# Altium footprint library My_FOC_v1.PcbLib: 11 footprints
Each footprint in its own frame and in the unit in brackets; x right, y up, seen from the top. Pads: shape width x height; smd on the part's side, far side on the other; paste and mask are expansions set on the pad; w line width, h text height; cw(c..) or ccw(c..) is an arc to the next point about the centre after c.
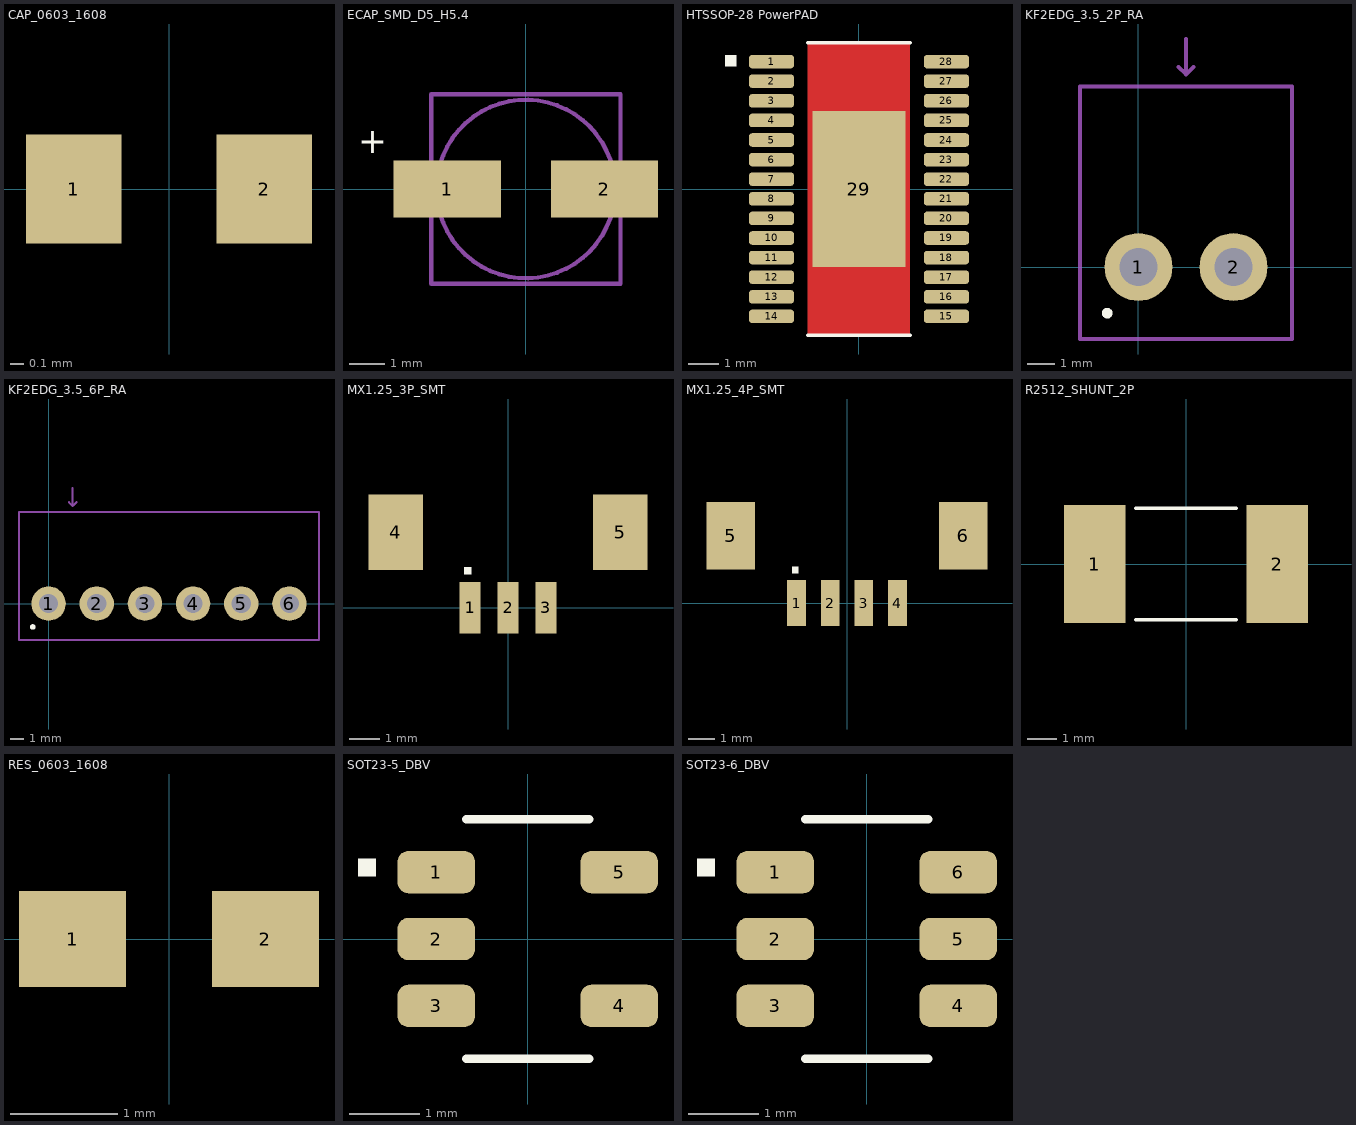
[diagram p0: the footprints below, top view; thin cyan lines are the x and y axes]

## CAP_0603_1608 [mm]
pads (2):
  rect 0.7x0.8 smd mask+0: 1(-0.7,0) 2(0.7,0)

## ECAP_SMD_D5_H5.4 [mm]
pads (2):
  rect 3x1.6 smd mask+0: 1(-2.2,0) 2(2.2,0)
Top Overlay:
  text "+" at -4.699,0.765 h1.2
Mechanical 1:
  circle w0.12: c0,0 r2.5
  lines w0.12: -2.65,-2.65 2.65,-2.65 2.65,2.65 -2.65,2.65 -2.65,-2.65

## HTSSOP-28 PowerPAD [mm] "Need to design Vias"
pads (29):
  rrect50% 1.5x0.45 smd: 1(-2.9,4.225) 2(-2.9,3.575) 3(-2.9,2.925) 4(-2.9,2.275) 5(-2.9,1.625) 6(-2.9,0.975) 7(-2.9,0.325) 8(-2.9,-0.325) 9(-2.9,-0.975) 10(-2.9,-1.625) 11(-2.9,-2.275) 12(-2.9,-2.925) 13(-2.9,-3.575) 14(-2.9,-4.225) 15(2.9,-4.225) 16(2.9,-3.575) 17(2.9,-2.925) 18(2.9,-2.275) 19(2.9,-1.625) 20(2.9,-0.975) 21(2.9,-0.325) 22(2.9,0.325) 23(2.9,0.975) 24(2.9,1.625) 25(2.9,2.275) 26(2.9,2.925) 27(2.9,3.575) 28(2.9,4.225)
  rect 3.1x5.18 smd paste+0 mask+0: 29(0,0)
Top Layer:
  rectangle: -1.7,-4.85 1.7,4.85
Top Overlay:
  rectangle: -4.445,4.064 -4.064,4.445
  lines w0.12: -1.7,-4.85 1.7,-4.85 ; -1.7,4.85 1.7,4.85

## KF2EDG_3.5_2P_RA [mm]
pads (2):
  round 2.5 hole 1.4: 1(0,0) 2(3.5,0)
Top Overlay:
  circle w0.254: c-1.15,-1.7 r0.071
Mechanical 1:
  lines w0.15: 1.475,7.375 1.725,7.125 ; 1.75,7.1 1.75,8.4 ; 1.776,7.118 2.026,7.368 ; -2.15,-2.65 -2.15,6.65 5.65,6.65 5.65,-2.65 -2.15,-2.65
  text "INSERT" at -0.78,4.12 h0.8

## KF2EDG_3.5_6P_RA [mm]
pads (6):
  round 2.5 hole 1.4: 1(0,0) 2(3.5,0) 3(7,0) 4(10.5,0) 5(14,0) 6(17.5,0)
Top Overlay:
  circle w0.254: c-1.15,-1.7 r0.071
Mechanical 1:
  lines w0.15: 1.475,7.375 1.725,7.125 ; 1.75,7.1 1.75,8.4 ; 1.776,7.118 2.026,7.368 ; -2.15,-2.65 19.65,-2.65 19.65,6.65 -2.15,6.65 -2.15,-2.65
  text "INSERT" at -0.78,4.12 h0.8

## MX1.25_3P_SMT [mm]
pads (5):
  rect 0.7x1.7 smd: 1(-1.25,0) 2(0,0) 3(1.25,0)
  rect 1.8x2.5 smd: 4(-3.7,2.5) 5(3.7,2.5)
Top Overlay:
  rectangle: -1.45,1.1 -1.2,1.35

## MX1.25_4P_SMT [mm]
pads (6):
  rect 0.7x1.7 smd: 1(-1.875,0) 2(-0.625,0) 3(0.625,0) 4(1.875,0)
  rect 1.8x2.5 smd: 5(-4.325,2.5) 6(4.325,2.5)
Top Overlay:
  rectangle: -2.05,1.1 -1.8,1.35

## R2512_SHUNT_2P [mm]
pads (2):
  rect 2.1x4 smd mask+0: 1(-3.1,0) 2(3.1,0)
Top Overlay:
  lines w0.12: -1.7,-1.9 1.7,-1.9 ; -1.7,1.9 1.7,1.9

## RES_0603_1608 [mm]
pads (2):
  rect 1x0.9 smd mask+0: 1(-0.9,0) 2(0.9,0)

## SOT23-5_DBV [mm]
pads (5):
  rrect50% 1.1x0.6 smd: 1(-1.3,0.95) 2(-1.3,0) 3(-1.3,-0.95) 4(1.3,-0.95) 5(1.3,0.95)
Top Overlay:
  rectangle: -2.413,0.889 -2.159,1.143
  lines w0.12: -0.875,-1.7 0.875,-1.7 ; -0.875,1.7 0.875,1.7

## SOT23-6_DBV [mm]
pads (6):
  rrect50% 1.1x0.6 smd: 1(-1.3,0.95) 2(-1.3,0) 3(-1.3,-0.95) 4(1.3,-0.95) 5(1.3,0) 6(1.3,0.95)
Top Overlay:
  rectangle: -2.413,0.889 -2.159,1.143
  lines w0.12: -0.875,-1.7 0.875,-1.7 ; -0.875,1.7 0.875,1.7